# Altium footprint library standard-case.PcbLib: 285 footprints (part 1 of 18)
Each footprint in its own frame and in the unit in brackets; x right, y up, seen from the top. Pads: shape width x height; smd on the part's side, far side on the other; paste and mask are expansions set on the pad; w line width, h text height; cw(c..) or ccw(c..) is an arc to the next point about the centre after c.
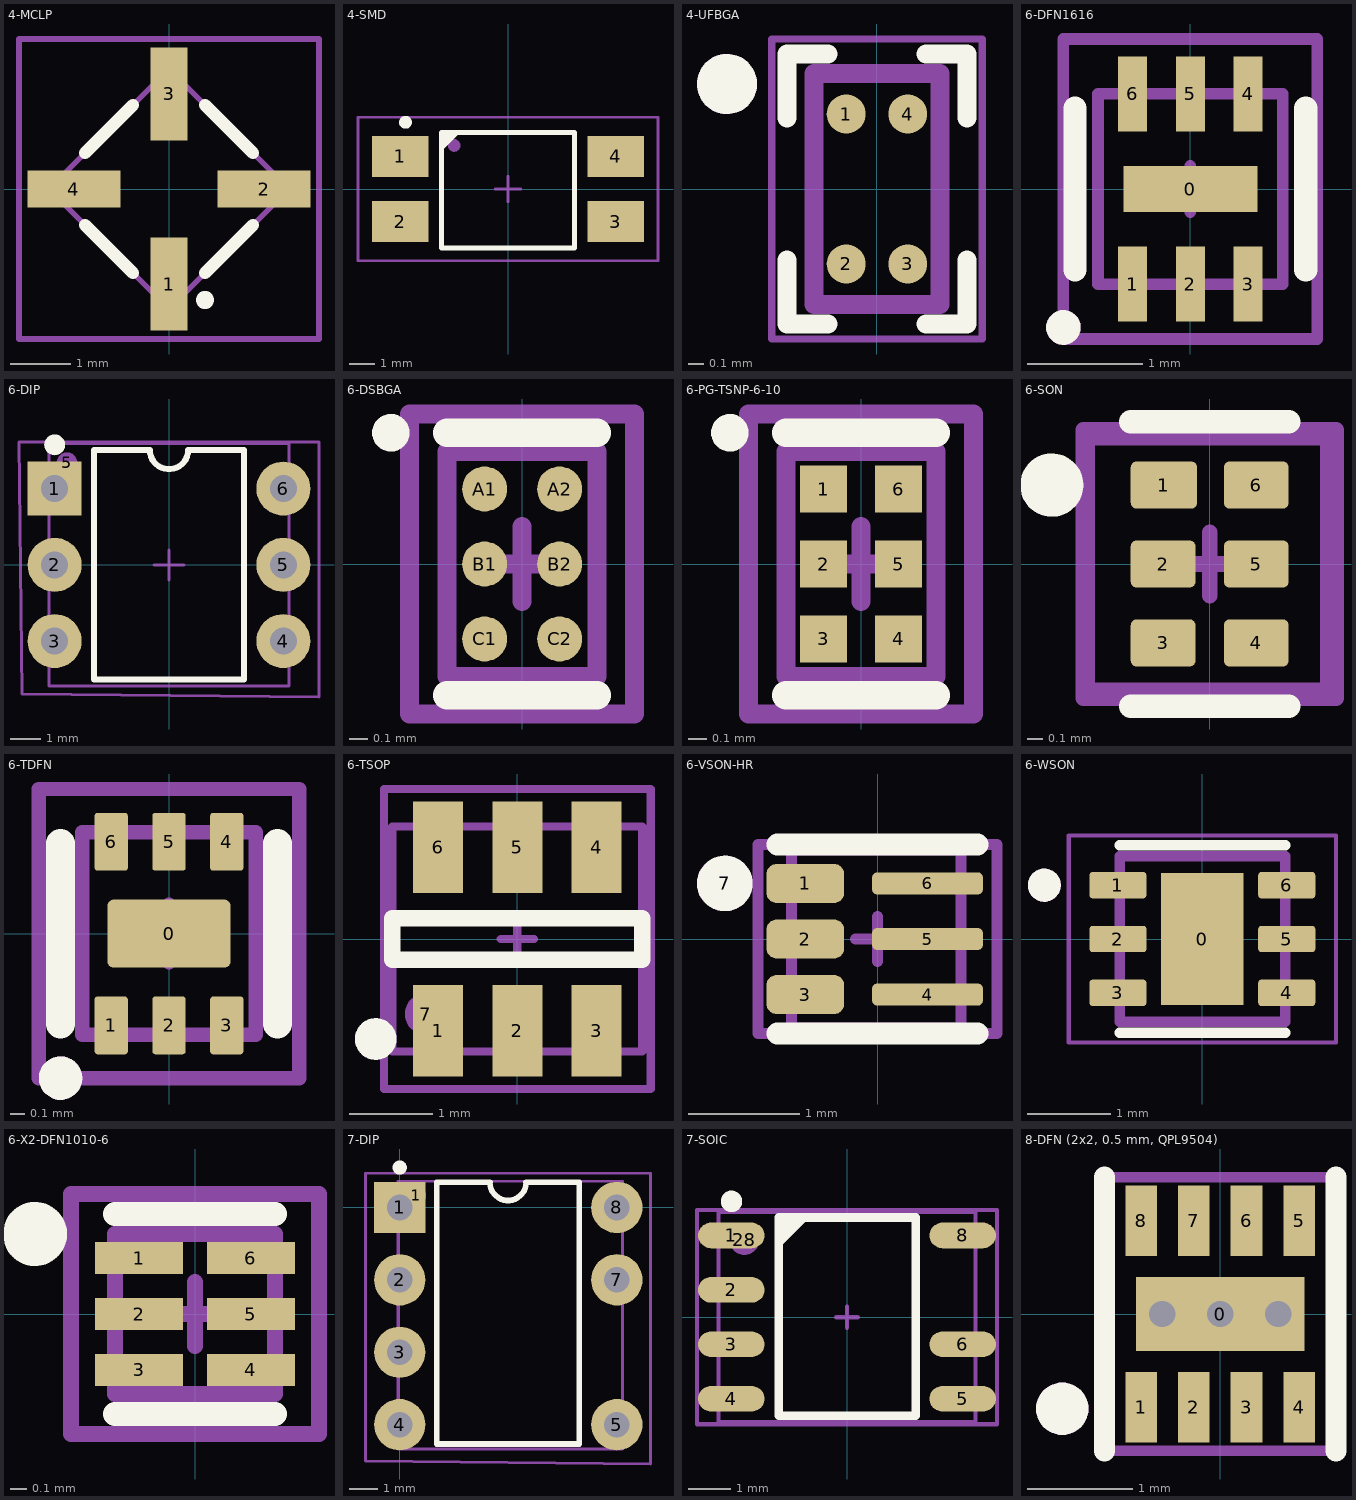
[diagram p0: the footprints below, top view; thin cyan lines are the x and y axes]

## 4-MCLP [mm] "LEE-9+"
height 4
pads (4):
  rect 0.61x1.55 smd: 1(0,-1.585) 3(0,1.585)
  rect 1.55x0.61 smd: 2(1.585,0) 4(-1.585,0)
Top Overlay:
  lines w0.2: -1.4,-0.6 -0.6,-1.4 ; -1.4,0.6 -0.6,1.4 ; 0.6,-1.4 1.4,-0.6 ; 0.6,1.4 1.4,0.6 ; 0.6,-1.9 ccw(c0.6,-1.85) 0.6,-1.8 ; 0.6,-1.9 cw(c0.6,-1.85) 0.6,-1.8 ; 0.6,-1.9 ccw(c0.6,-1.85) 0.6,-1.8
Top 3D Body:
  lines w0.1: -2,0 0,2 2,0 0,-2 -2,0
Top Courtyard:
  lines w0.1: -2.5,-2.5 2.5,-2.5 2.5,2.5 -2.5,2.5 -2.5,-2.5
3D body "LEE-9+.stp": height 0.99, standoff 0, extent -2,-2 2,2

## 4-SMD [mm] "SOIC, 4-Leads, Body 4,60x6,50mm, Pitch 1,27mm, IPC Medium Density"
height 4
pads (5):
  rect 2.2x1.6 smd: 1(-4.2,1.27) 2(-4.2,-1.27) 3(4.2,-1.27) 4(4.2,1.27)
  round 0.5 on Mech1: ""(-2.1,1.7)
Top Overlay:
  circle w0.25: c-4,2.6 r0.125
  region: -2.6,2.2 -2.6,1.48 -1.88,2.2
  lines w0.2: -2.6,-2.3 2.6,-2.3 2.6,2.2 -2.6,2.2 -2.6,-2.3
Mechanical 1:
  lines w0.1: -2.6,-2.3 2.6,-2.3 2.6,2.2 -2.6,2.2 -2.6,-2.3
Mechanical 15:
  lines w0.1: -0.5,0 0.5,0 ; 0,-0.5 0,0.5 ; -5.85,-2.8 5.85,-2.8 5.85,2.8 -5.85,2.8 -5.85,-2.8
3D body "PC817 Gullwing Assembly.STEP": height 3.75, standoff -0.1, extent -5,-2.28 5,2.3

## 4-UFBGA [mm] "TCXO"
height 4
pads (4):
  round 0.26 smd: 1(-0.205,0.5) 2(-0.205,-0.5) 3(0.205,-0.5) 4(0.205,0.5)
Top Overlay:
  circle w0.2: c-1,0.7 r0.1
  lines w0.127: -0.6,-0.475 -0.6,-0.9 -0.327,-0.9 ; -0.6,0.475 -0.6,0.9 -0.327,0.9 ; 0.327,-0.9 0.6,-0.9 0.6,-0.475 ; 0.327,0.9 0.6,0.9 0.6,0.475
Mechanical 13:
  circle w0.2: c-1,0.7 r0.1
  lines w0.127: -0.42,-0.77 -0.42,0.77 0.42,0.77 0.42,-0.77 -0.42,-0.77
Mechanical 15:
  lines w0.05: -0.7,-1 -0.7,1 0.7,1 0.7,-1 -0.7,-1
3D body "step_temp.STEP": height 0.6, standoff 0, extent -0.42,-0.77 0.42,0.77

## 6-DFN1616 [mm] "pitch 0.5 mm"
pads (7):
  rect 1.16x0.4 smd: 0(0,0)
  rect 0.25x0.65 smd: 1(-0.5,-0.825) 2(0,-0.825) 3(0.5,-0.825) 4(0.5,0.825) 5(0,0.825) 6(-0.5,0.825)
Top Overlay:
  circle w0.15: c-1.1,-1.2 r0.075
  lines w0.2: -1,-0.7 -1,0.7 ; 1,-0.7 1,0.7
Mechanical 1:
  circle w0.15: c-1.1,-1.2 r0.075
  lines w0.1: -0.8,-0.825 0.8,-0.825 0.8,0.825 -0.8,0.825 -0.8,-0.825
Mechanical 15:
  lines w0.1: -0.2,0 0.2,0 ; 0,-0.2 0,0.2 ; -1.1,-1.3 -1.1,1.3 1.1,1.3 1.1,-1.3 -1.1,-1.3
3D body "DFN-6 1.6x1.6 Pad.STEP": height 0.5, standoff 0, extent -0.8,-0.8 0.8,0.8

## 6-DIP [mm] "pitch 2.54 mm"
height 5.6
pads (8):
  rect 1.8x1.8 hole 0.9: 1(-3.81,2.54)
  round 1.8 hole 0.9: 2(-3.81,0) 3(-3.81,-2.54) 4(3.81,-2.54) 5(3.81,0) 6(3.81,2.54)
  round 0.7 on Mech1: 5(-3.4,3.4)
  round 0.7 on Top Overlay: ""(-3.81,4)
Top Overlay:
  lines w0.2: -2.5,-3.82 2.5,-3.82 2.5,3.82 0.635,3.82 cw(c0,3.82) -0.635,3.82 -2.5,3.82 -2.5,-3.82
Mechanical 1:
  lines w0.1: -4,-4.04 4,-4.04 4,4.04 -4,4.04 -4,-4.04
Mechanical 15:
  lines w0.1: -0.5,0 0.5,0 ; 0,-0.5 0,0.5 ; -5,4.1 5,4.1 5,-4.4 -4.9,-4.3 -5,4.1
3D body "CircuitWorks-DIP6.step": height 4.31, standoff -3.28, extent -4,-4.04 4,4.04

## 6-DSBGA [mm] "pitch 0.4 mm"
pads (6):
  round 0.24 smd paste-2539.97: A1(-0.2,0.4) A2(0.2,0.4) B1(-0.2,0) B2(0.2,0) C1(-0.2,-0.4) C2(0.2,-0.4)
Top Overlay:
  circle w0.1: c-0.7,0.7 r0.05
  lines w0.15: -0.4,-0.7 0.4,-0.7 ; -0.4,0.7 0.4,0.7
Top Paste:
  circle w0.125: c-0.2,0.4 r0.062
  circle w0.125: c0.2,0.4 r0.062
  circle w0.125: c0.2,0 r0.062
  circle w0.125: c-0.2,0 r0.062
  circle w0.125: c-0.2,-0.4 r0.062
  circle w0.125: c0.2,-0.4 r0.062
Mechanical 1:
  lines w0.1: -0.4,-0.6 0.4,-0.6 0.4,0.6 -0.4,0.6 -0.4,-0.6
Mechanical 15:
  lines w0.1: -0.2,0 0.2,0 ; 0,-0.2 0,0.2 ; -0.6,-0.8 -0.6,0.8 0.6,0.8 0.6,-0.8 -0.6,-0.8
3D body "PG-TSNP-6-10.STEP": height 0.38, standoff 0.01, extent -0.35,-0.55 0.35,0.55

## 6-PG-TSNP-6-10 [mm] "pitch 0.4 mm"
pads (6):
  rect 0.25x0.25 smd paste-2539.97: 1(-0.2,0.4) 2(-0.2,0) 3(-0.2,-0.4) 4(0.2,-0.4) 5(0.2,0) 6(0.2,0.4)
Top Overlay:
  circle w0.1: c-0.7,0.7 r0.05
  lines w0.15: -0.4,-0.7 0.4,-0.7 ; -0.4,0.7 0.4,0.7
Top Paste:
  circle w0.125: c0.2,-0.4 r0.062
  circle w0.125: c-0.2,-0.4 r0.062
  circle w0.125: c-0.2,0 r0.062
  circle w0.125: c0.2,0 r0.062
  circle w0.125: c0.2,0.4 r0.062
  circle w0.125: c-0.2,0.4 r0.062
Mechanical 1:
  lines w0.1: -0.4,-0.6 -0.4,0.6 0.4,0.6 0.4,-0.6 -0.4,-0.6
Mechanical 15:
  lines w0.1: -0.2,0 0.2,0 ; 0,-0.2 0,0.2 ; -0.6,-0.8 0.6,-0.8 0.6,0.8 -0.6,0.8 -0.6,-0.8
3D body "PG-TSNP-6-10.STEP": height 0.38, standoff 0.01, extent -0.35,-0.55 0.35,0.55

## 6-SON [mm] "pitch 0.5 mm"
pads (6):
  rrect25% 0.42x0.3 smd: 1(-0.29,0.5)
  rrect25% 0.41x0.3 smd: 2(-0.295,0) 3(-0.295,-0.5) 4(0.295,-0.5) 5(0.295,0) 6(0.295,0.5)
Top Overlay:
  circle w0.2: c-1,0.5 r0.1
  lines w0.15: -0.5,-0.9 0.5,-0.9 ; -0.5,0.9 0.5,0.9
Mechanical 1:
  lines w0.1: -0.775,-0.8 -0.775,0.8 0.75,0.8 0.75,-0.8 -0.775,-0.8
Mechanical 15:
  lines w0.1: -0.2,0 0.2,0 ; 0,-0.2 0,0.2 ; -0.8,-0.85 0.8,-0.85 0.8,0.85 -0.8,0.85 -0.8,-0.85
3D body "step_temp.STEP": height 0.6, standoff 0, extent -0.5,-0.725 0.5,0.725

## 6-TDFN [mm] "pitch 0.5 mm"
pads (7):
  rrect17% 0.85x0.47 smd paste-2: 0(0,0)
  rrect17% 0.23x0.4 smd: 1(-0.4,-0.635) 2(0,-0.635) 3(0.4,-0.635) 4(0.4,0.635) 5(0,0.635) 6(-0.4,0.635)
Top Overlay:
  circle w0.15: c-0.75,-1 r0.075
  lines w0.2: -0.75,-0.625 -0.75,0.625 ; 0.75,-0.625 0.75,0.625
Mechanical 1:
  circle w0.15: c-0.75,-1 r0.075
  lines w0.1: -0.6,-0.7 -0.6,0.7 0.6,0.7 0.6,-0.7 -0.6,-0.7
Mechanical 15:
  lines w0.1: -0.2,0 0.2,0 ; 0,-0.2 0,0.2 ; -0.9,-1 0.9,-1 0.9,1 -0.9,1 -0.9,-1
3D body "6-TDFN.STEP": height 0.75, standoff 0, extent -0.6,-0.75 0.6,0.75

## 6-TSOP [mm] "pitch 0.95 mm"
pads (7):
  rect 0.6x1.1 smd: 1(-0.95,-1.1) 2(0,-1.1) 3(0.95,-1.1) 4(0.95,1.1) 5(0,1.1) 6(-0.95,1.1)
  round 0.5 on Mech1: 7(-1.1,-0.9)
Top Overlay:
  circle w0.25: c-1.7,-1.2 r0.125
  lines w0.2: -1.5,-0.25 -1.5,0.25 1.5,0.25 1.5,-0.25 -1.5,-0.25
Mechanical 1:
  lines w0.1: -1.5,-1.35 1.5,-1.35 1.5,1.35 -1.5,1.35 -1.5,-1.35
Mechanical 15:
  lines w0.1: -0.2,0 0.2,0 ; 0,-0.2 0,0.2 ; -1.6,-1.8 -1.6,1.8 1.6,1.8 1.6,-1.8 -1.6,-1.8
3D body "User Library-TSOP-6.STEP": height 1, standoff 0, extent -1.5,-1.35 1.5,1.35

## 6-VSON-HR [mm] "pitch 0.5 mm"
pads (7):
  rrect50% 0.7x0.35 smd mask-0.05: 1(-0.65,0.5) 2(-0.65,0) 3(-0.65,-0.5)
  rrect50% 1x0.2 smd mask+0.05: 4(0.45,-0.5) 5(0.45,0) 6(0.45,0.5)
  round 0.5 on Mech1: 7(-1.375,0.5)
Top Overlay:
  circle w0.25: c-1.375,0.5 r0.125
  lines w0.2: -0.9,-0.85 0.9,-0.85 ; -0.9,0.85 0.9,0.85
Mechanical 1:
  lines w0.1: -0.775,-0.8 0.75,-0.8 0.75,0.8 -0.775,0.8 -0.775,-0.8
Mechanical 15:
  lines w0.1: -0.2,0 0.2,0 ; 0,-0.2 0,0.2 ; -1.075,-0.85 -1.075,0.85 1.075,0.85 1.075,-0.85 -1.075,-0.85
3D body "VSON_HR(6).STEP": height 0.99, standoff -0.01, extent -0.751,-0.75 0.751,0.75

## 6-WSON [mm]
pads (7):
  rect 1x1.6 smd paste-2: 0(0,0)
  rrect25% 0.69x0.32 smd: 1(-1.02,0.65) 2(-1.02,0) 3(-1.02,-0.65) 4(1.02,-0.65) 5(1.02,0) 6(1.02,0.65)
Top Overlay:
  circle w0.2: c-1.91,0.65 r0.1
  lines w0.127: -1,-1.13 1,-1.13 ; -1,1.13 1,1.13
Top Paste:
  region: 0.316,-0.506 -0.316,-0.506 -0.316,0.506 0.316,0.506
Mechanical 13:
  circle w0.2: c-1.91,0.65 r0.1
  lines w0.127: -1,-1 -1,1 1,1 1,-1 -1,-1
Mechanical 15:
  lines w0.05: -1.615,-1.25 -1.615,1.25 1.615,1.25 1.615,-1.25 -1.615,-1.25
3D body "TPS7B8133DRVR.STEP": height 0.8, standoff 0, extent -1,-1 1,1

## 6-X2-DFN1010-6 [mm] "pitch 0.35 mm"
pads (6):
  rect 0.55x0.2 smd: 1(-0.35,0.35) 2(-0.35,0) 3(-0.35,-0.35) 4(0.35,-0.35) 5(0.35,0) 6(0.35,0.35)
Top Overlay:
  circle w0.2: c-1,0.5 r0.1
  lines w0.15: -0.5,-0.625 0.5,-0.625 ; -0.5,0.625 0.5,0.625
Mechanical 1:
  lines w0.1: -0.5,-0.5 0.5,-0.5 0.5,0.5 -0.5,0.5 -0.5,-0.5
Mechanical 15:
  lines w0.1: -0.2,0 0.2,0 ; 0,-0.2 0,0.2 ; -0.775,-0.75 -0.775,0.75 0.775,0.75 0.775,-0.75 -0.775,-0.75
3D body: height 0.4, standoff 0.01, extent -0.5,-0.5 0.5,0.5

## 7-DIP [mm] "pitch 2.54 mm"
height 5.08
pads (8):
  rect 1.8x1.8 hole 0.9: 1(0,0)
  round 0.7 on Mech1: 1(0.58,0.42)
  round 1.8 hole 0.9: 2(0,-2.54) 3(0,-5.08) 4(0,-7.62) 5(7.62,-7.62) 7(7.62,-2.54) 8(7.62,0)
Top Overlay:
  circle w0.25: c0,1.4 r0.125
  lines w0.2: 1.3,-8.3 1.3,0.88 3.165,0.88 ccw(c3.8,0.88) 4.435,0.88 6.3,0.88 6.3,-8.3 1.3,-8.3
Mechanical 1:
  lines w0.1: -0.055,-8.48 -0.055,0.92 7.815,0.92 7.815,-8.48 -0.055,-8.48
Mechanical 15:
  lines w0.1: -1.2,-8.9 8.8,-9 8.8,-6.6 8.8,1.2 -1.2,1.2 -1.2,-0.5 -1.2,-8.9
3D body "DIP-7 (VIPER28).stp": height 4.36, standoff -3, extent -0.035,-8.5 7.835,0.9

## 7-SOIC [mm] "pitch 1.27 mm"
height 5.08
pads (8):
  rrect100% 1.55x0.6 smd: 1(-2.7,1.905) 2(-2.7,0.635) 3(-2.7,-0.635) 4(-2.7,-1.905) 5(2.7,-1.905) 6(2.7,-0.635) 8(2.7,1.905)
  round 0.7 on Mech1: 28(-2.395,1.8)
Top Overlay:
  circle w0.25: c-2.695,2.7 r0.125
  region: -1.595,2.325 -1.595,1.605 -0.875,2.325
  lines w0.2: -1.595,-2.3 -1.595,2.325 1.605,2.325 1.605,-2.3 -1.595,-2.3
Mechanical 1:
  lines w0.1: -3,-2.45 3,-2.45 3,2.45 -3,2.45 -3,-2.45
Mechanical 15:
  lines w0.1: -0.25,0 0.25,0 ; 0,-0.25 0,0.25 ; -3.5,-2.5 3.5,-2.5 3.5,2.5 -3.5,2.5 -3.5,-2.5
3D body "User Library-SOIC-8-1.STEP": height 1.75, standoff 0, extent -3,-2.45 3,2.45

## 8-DFN (2x2, 0.5 mm, QPL9504) [mm] "2x2 mm, pitch 0.5 mm, power pad"
height 0.75
pads (11):
  rect 1.6x0.7 smd mask+0.05: 0(0,0)
  rect 0.3x0.67 smd mask+0.05: 1(-0.75,-0.885) 2(-0.25,-0.885) 3(0.25,-0.885) 4(0.75,-0.885) 5(0.75,0.885) 6(0.25,0.885) 7(-0.25,0.885) 8(-0.75,0.885)
  round 0.5 on Mech1 mask+0.05: ""(-1.5,-0.9)
  round 0.5 on Top Overlay mask+0.05: ""(-1.5,-0.9)
via 0,0 diameter 0.5 hole 0.25
via -0.55,0 diameter 0.5 hole 0.25
via 0.55,0 diameter 0.5 hole 0.25
Top Overlay:
  lines w0.2: -1.1,-1.3 -1.1,1.3 ; 1.1,-1.3 1.1,1.3
Mechanical 1:
  lines w0.1: -1.1,-1.3 1.1,-1.3 1.1,1.3 -1.1,1.3 -1.1,-1.3
Mechanical 15:
  lines w0.1: -0.2,0 0.2,0 ; 0,-0.2 0,0.2 ; -1.1,-1.3 -1.1,1.3 1.1,1.3 1.1,-1.3 -1.1,-1.3
3D body "DFN2x2_8.STEP": height 0.85, standoff 0, extent -1,-1.01 1,1.01